# Altium integrated library NCP18XH103J03RB.IntLib: 1 symbol
Pins are listed as number, name and electrical type; pins without a type are passive.

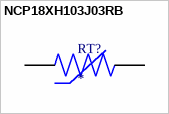
[diagram p0: symbol NCP18XH103J03RB]

## NCP18XH103J03RB
designator RT?
NTC Thermistor 10k 0603 (1608 Metric); MP: NCP18XH103J03RB; Package: None; Price: None; Value: *; Availability: Unavailable
footprint THRMC1608X95N
pins: 1, 2